# Altium footprint library SC-32S_C97604.PcbLib: 1 footprints
Each footprint in its own frame and in the unit in brackets; x right, y up, seen from the top. Pads: shape width x height; smd on the part's side, far side on the other; paste and mask are expansions set on the pad; w line width, h text height; cw(c..) or ccw(c..) is an arc to the next point about the centre after c.
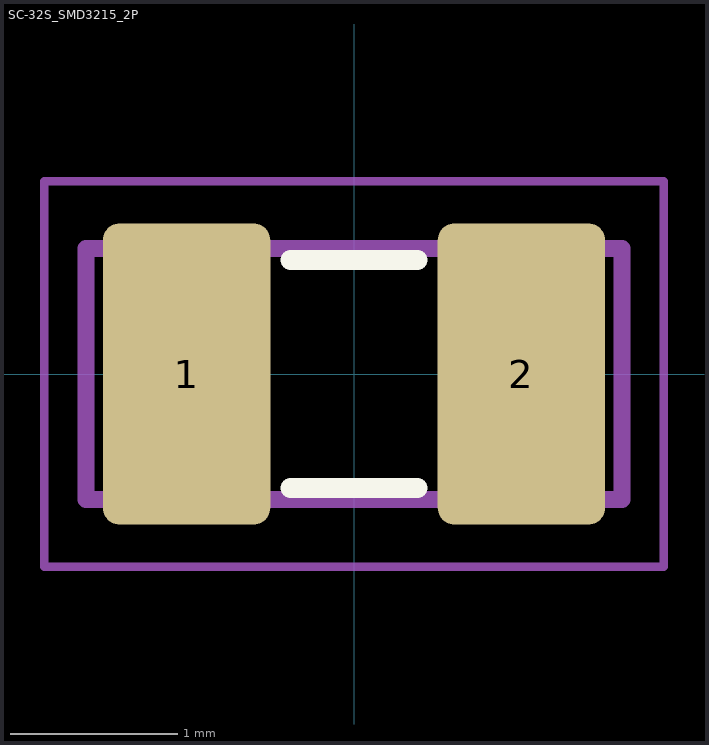
[diagram p0: the footprint, top view; thin cyan lines are the x and y axes]

## SC-32S_SMD3215_2P [mm] "Seiko SC-32S 3215 two-pad crystal; manufacturer recommended land pattern"
pads (2):
  rrect20% 1x1.8 smd: 1(-1,0) 2(1,0)
Top Overlay:
  lines w0.12: -0.38,-0.68 0.38,-0.68 ; -0.38,0.68 0.38,0.68
Mechanical 1:
  lines w0.05: -1.85,-1.15 -1.85,1.15 1.85,1.15 1.85,-1.15 -1.85,-1.15
Mechanical 13:
  lines w0.1: -1.6,-0.75 -1.6,0.75 1.6,0.75 1.6,-0.75 -1.6,-0.75
3D body: height 0.85, standoff 0, extent -1.6,-0.75 1.6,0.75